# Altium footprint library E22-XXXT30、33S.PcbLib: 1 footprints
Each footprint in its own frame and in the unit in brackets; x right, y up, seen from the top. Pads: shape width x height; smd on the part's side, far side on the other; paste and mask are expansions set on the pad; w line width, h text height; cw(c..) or ccw(c..) is an arc to the next point about the centre after c.
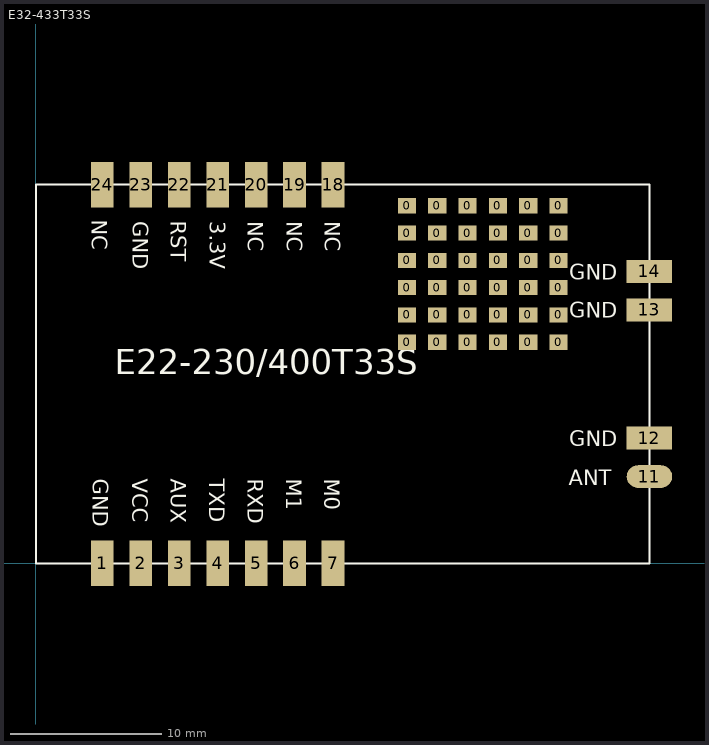
[diagram p0: the footprint, top view; thin cyan lines are the x and y axes]

## E32-433T33S [mm]
pads (54):
  rect 1.2x1 smd: 0(24.5,14.6) 0(24.5,16.4) 0(24.5,18.2) 0(24.5,20) 0(24.5,21.8) 0(24.5,23.6) 0(26.5,14.6) 0(26.5,16.4) 0(26.5,18.2) 0(26.5,20) 0(26.5,21.8) 0(26.5,23.6) 0(28.5,14.6) 0(28.5,16.4) 0(28.5,18.2) 0(28.5,20) 0(28.5,21.8) 0(28.5,23.6) 0(30.5,14.6) 0(30.5,16.4) 0(30.5,18.2) 0(30.5,20) 0(30.5,21.8) 0(30.5,23.6) 0(32.5,14.6) 0(32.5,16.4) 0(32.5,18.2) 0(32.5,20) 0(32.5,21.8) 0(32.5,23.6) 0(34.5,14.6) 0(34.5,16.4) 0(34.5,18.2) 0(34.5,20) 0(34.5,21.8) 0(34.5,23.6)
  rect 1.5x3 smd: 1(4.38,0) 2(6.92,0) 3(9.46,0) 4(12,0) 5(14.54,0) 6(17.08,0) 7(19.62,0) 18(19.62,25) 19(17.08,25) 20(14.54,25) 21(12,25) 22(9.46,25) 23(6.92,25) 24(4.38,25)
  oval 3x1.5 smd: 11(40.5,5.73)
  rect 3x1.5 smd: 12(40.5,8.27) 13(40.5,16.73) 14(40.5,19.27)
Top Overlay:
  lines w0.127: 0,0 0,25 40.5,25 40.5,0 0,0
  text "E22-230/400T33S" at 5.207,11.938 h2.8
  text "GND" at 35.222,7.72 h1
  text "ANT" at 35.174,5.17 h1
  text "M0" at 19.043,5.575 h1
  text "M1" at 16.533,5.575 h1
  text "RXD" at 13.983,5.575 h1
  text "TXD" at 11.453,5.575 h1
  text "AUX" at 8.913,5.575 h1
  text "VCC" at 6.363,5.575 h1
  text "GND" at 3.773,5.575 h1
  text "NC" at 3.693,22.692 h1
  text "GND" at 6.383,22.592 h1
  text "3.3V" at 11.473,22.592 h1
  text "NC" at 14.003,22.592 h1
  text "NC" at 16.553,22.592 h1
  text "NC" at 19.063,22.592 h1
  text "GND" at 35.222,16.22 h1
  text "GND" at 35.222,18.73 h1
  text "RST" at 8.89,22.606 h1